# Altium footprint library Connector Header 254 Right Angel.PcbLib: 49 footprints (part 4 of 4)
Each footprint in its own frame and in the unit in brackets; x right, y up, seen from the top. Pads: shape width x height; smd on the part's side, far side on the other; paste and mask are expansions set on the pad; w line width, h text height; cw(c..) or ccw(c..) is an arc to the next point about the centre after c.
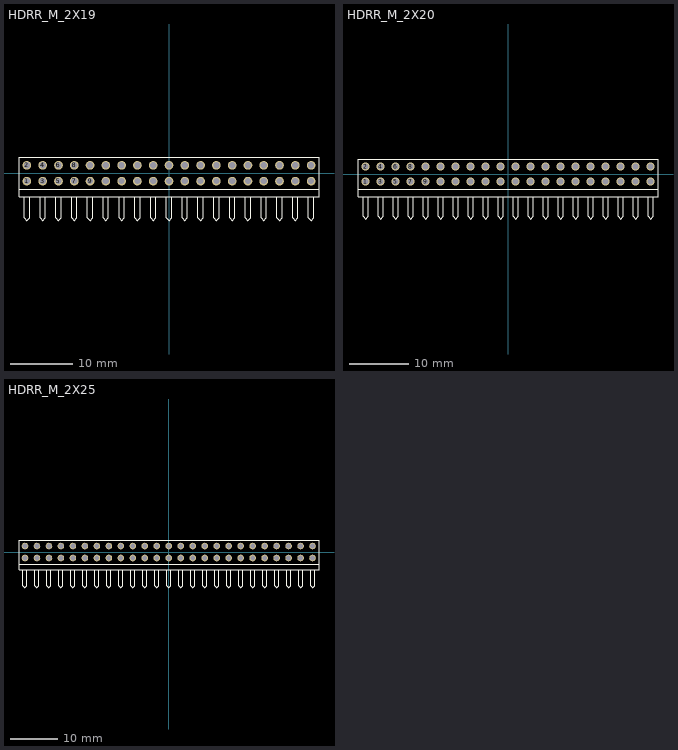
[diagram p3: the footprints below, top view; thin cyan lines are the x and y axes]

## HDRR_M_2X19 [mm] "Connector; Header; 19x2 Position"
height 7
pads (38):
  round 1.4 / inner round 1.4 / far side oval 1.4x2.2 hole 1: 1(-22.86,-1.27) 2(-22.86,1.27) 3(-20.32,-1.27) 4(-20.32,1.27) 5(-17.78,-1.27) 6(-17.78,1.27) 7(-15.24,-1.27) 8(-15.24,1.27) 9(-12.7,-1.27) 10(-12.7,1.27) 11(-10.16,-1.27) 12(-10.16,1.27) 13(-7.62,-1.27) 14(-7.62,1.27) 15(-5.08,-1.27) 16(-5.08,1.27) 17(-2.54,-1.27) 18(-2.54,1.27) 19(0,-1.27) 20(0,1.27) 21(2.54,-1.27) 22(2.54,1.27) 23(5.08,-1.27) 24(5.08,1.27) 25(7.62,-1.27) 26(7.62,1.27) 27(10.16,-1.27) 28(10.16,1.27) 29(12.7,-1.27) 30(12.7,1.27) 31(15.24,-1.27) 32(15.24,1.27) 33(17.78,-1.27) 34(17.78,1.27) 35(20.32,-1.27) 36(20.32,1.27) 37(22.86,-1.27) 38(22.86,1.27)
Top Overlay:
  lines w0.2: -23.283,-3.81 -23.283,-7.197 -22.86,-7.62 -22.437,-7.197 -22.437,-3.81 ; -20.743,-3.81 -20.743,-7.197 -20.32,-7.62 -19.897,-7.197 -19.897,-3.81 ; -18.203,-3.81 -18.203,-7.197 -17.78,-7.62 -17.357,-7.197 -17.357,-3.81 ; -15.663,-3.81 -15.663,-7.197 -15.24,-7.62 -14.817,-7.197 -14.817,-3.81 ; -13.123,-3.81 -13.123,-7.197 -12.7,-7.62 -12.277,-7.197 -12.277,-3.81 ; -10.583,-3.81 -10.583,-7.197 -10.16,-7.62 -9.737,-7.197 -9.737,-3.81 ; -8.043,-3.81 -8.043,-7.197 -7.62,-7.62 -7.197,-7.197 -7.197,-3.81 ; -5.503,-3.81 -5.503,-7.197 -5.08,-7.62 -4.657,-7.197 -4.657,-3.81 ; -2.963,-3.81 -2.963,-7.197 -2.54,-7.62 -2.117,-7.197 -2.117,-3.81 ; -0.423,-3.81 -0.423,-7.197 0,-7.62 0.423,-7.197 0.423,-3.81 ; 2.117,-3.81 2.117,-7.197 2.54,-7.62 2.963,-7.197 2.963,-3.81 ; 4.657,-3.81 4.657,-7.197 5.08,-7.62 5.503,-7.197 5.503,-3.81 ; 7.197,-3.81 7.197,-7.197 7.62,-7.62 8.043,-7.197 8.043,-3.81 ; 9.737,-3.81 9.737,-7.197 10.16,-7.62 10.583,-7.197 10.583,-3.81 ; 12.277,-3.81 12.277,-7.197 12.7,-7.62 13.123,-7.197 13.123,-3.81 ; 14.817,-3.81 14.817,-7.197 15.24,-7.62 15.663,-7.197 15.663,-3.81 ; 17.357,-3.81 17.357,-7.197 17.78,-7.62 18.203,-7.197 18.203,-3.81 ; 19.897,-3.81 19.897,-7.197 20.32,-7.62 20.743,-7.197 20.743,-3.81 ; 22.437,-3.81 22.437,-7.197 22.86,-7.62 23.283,-7.197 23.283,-3.81 ; -24.13,-2.54 -24.13,-3.81 24.13,-3.81 24.13,-2.54 ; -24.13,-2.54 -24.13,2.54 24.13,2.54 24.13,-2.54 ; -24.13,-2.54 24.13,-2.54
3D body "PLS-1R.step": height 5.45, standoff -3, extent 19.05,-8.62 21.59,0
3D body "PLS-1Rr.stp": height 7.99, standoff -3, extent 19.05,-8.62 21.59,2.54
3D body "PLS-1Rr.stp": height 7.99, standoff -3, extent 16.51,-8.62 19.05,2.54
3D body "PLS-1R.step": height 5.45, standoff -3, extent 16.51,-8.62 19.05,0
3D body "PLS-1R.step": height 5.45, standoff -3, extent 13.97,-8.62 16.51,0
3D body "PLS-1Rr.stp": height 7.99, standoff -3, extent 13.97,-8.62 16.51,2.54
3D body "PLS-1Rr.stp": height 7.99, standoff -3, extent 11.43,-8.62 13.97,2.54
3D body "PLS-1R.step": height 5.45, standoff -3, extent 11.43,-8.62 13.97,0
3D body "PLS-1R.step": height 5.45, standoff -3, extent 8.89,-8.62 11.43,0
3D body "PLS-1Rr.stp": height 7.99, standoff -3, extent 8.89,-8.62 11.43,2.54
3D body "PLS-1Rr.stp": height 7.99, standoff -3, extent 6.35,-8.62 8.89,2.54
3D body "PLS-1R.step": height 5.45, standoff -3, extent 6.35,-8.62 8.89,0
3D body "PLS-1R.step": height 5.45, standoff -3, extent 3.81,-8.62 6.35,0
3D body "PLS-1Rr.stp": height 7.99, standoff -3, extent 3.81,-8.62 6.35,2.54
3D body "PLS-1Rr.stp": height 7.99, standoff -3, extent 1.27,-8.62 3.81,2.54
3D body "PLS-1R.step": height 5.45, standoff -3, extent 1.27,-8.62 3.81,0
3D body "PLS-1R.step": height 5.45, standoff -3, extent -1.27,-8.62 1.27,0
3D body "PLS-1Rr.stp": height 7.99, standoff -3, extent -1.27,-8.62 1.27,2.54
3D body "PLS-1Rr.stp": height 7.99, standoff -3, extent -3.81,-8.62 -1.27,2.54
3D body "PLS-1R.step": height 5.45, standoff -3, extent -3.81,-8.62 -1.27,0
3D body "PLS-1R.step": height 5.45, standoff -3, extent -6.35,-8.62 -3.81,0
3D body "PLS-1Rr.stp": height 7.99, standoff -3, extent -6.35,-8.62 -3.81,2.54
3D body "PLS-1Rr.stp": height 7.99, standoff -3, extent -8.89,-8.62 -6.35,2.54
3D body "PLS-1R.step": height 5.45, standoff -3, extent -8.89,-8.62 -6.35,0
3D body "PLS-1R.step": height 5.45, standoff -3, extent -11.43,-8.62 -8.89,0
3D body "PLS-1Rr.stp": height 7.99, standoff -3, extent -11.43,-8.62 -8.89,2.54
3D body "PLS-1Rr.stp": height 7.99, standoff -3, extent -13.97,-8.62 -11.43,2.54
3D body "PLS-1R.step": height 5.45, standoff -3, extent -13.97,-8.62 -11.43,0
3D body "PLS-1R.step": height 5.45, standoff -3, extent -16.51,-8.62 -13.97,0
3D body "PLS-1Rr.stp": height 7.99, standoff -3, extent -16.51,-8.62 -13.97,2.54
3D body "PLS-1Rr.stp": height 7.99, standoff -3, extent -19.05,-8.62 -16.51,2.54
3D body "PLS-1R.step": height 5.45, standoff -3, extent -19.05,-8.62 -16.51,0
3D body "PLS-1R.step": height 5.45, standoff -3, extent -21.59,-8.62 -19.05,0
3D body "PLS-1Rr.stp": height 7.99, standoff -3, extent -21.59,-8.62 -19.05,2.54
3D body "PLS-1Rr.stp": height 7.99, standoff -3, extent -24.13,-8.62 -21.59,2.54
3D body "PLS-1R.step": height 5.45, standoff -3, extent -24.13,-8.62 -21.59,0
3D body "PLS-1R.step": height 5.45, standoff -3, extent 21.59,-8.62 24.13,0
3D body "PLS-1Rr.stp": height 7.99, standoff -3, extent 21.59,-8.62 24.13,2.54

## HDRR_M_2X20 [mm] "Connector; Header; 20x2 Position"
height 7
pads (40):
  round 1.4 / inner round 1.4 / far side oval 1.4x2.2 hole 1: 1(-24.13,-1.27) 2(-24.13,1.27) 3(-21.59,-1.27) 4(-21.59,1.27) 5(-19.05,-1.27) 6(-19.05,1.27) 7(-16.51,-1.27) 8(-16.51,1.27) 9(-13.97,-1.27) 10(-13.97,1.27) 11(-11.43,-1.27) 12(-11.43,1.27) 13(-8.89,-1.27) 14(-8.89,1.27) 15(-6.35,-1.27) 16(-6.35,1.27) 17(-3.81,-1.27) 18(-3.81,1.27) 19(-1.27,-1.27) 20(-1.27,1.27) 21(1.27,-1.27) 22(1.27,1.27) 23(3.81,-1.27) 24(3.81,1.27) 25(6.35,-1.27) 26(6.35,1.27) 27(8.89,-1.27) 28(8.89,1.27) 29(11.43,-1.27) 30(11.43,1.27) 31(13.97,-1.27) 32(13.97,1.27) 33(16.51,-1.27) 34(16.51,1.27) 35(19.05,-1.27) 36(19.05,1.27) 37(21.59,-1.27) 38(21.59,1.27) 39(24.13,-1.27) 40(24.13,1.27)
Top Overlay:
  lines w0.2: -24.553,-3.81 -24.553,-7.197 -24.13,-7.62 -23.707,-7.197 -23.707,-3.81 ; -22.013,-3.81 -22.013,-7.197 -21.59,-7.62 -21.167,-7.197 -21.167,-3.81 ; -19.473,-3.81 -19.473,-7.197 -19.05,-7.62 -18.627,-7.197 -18.627,-3.81 ; -16.933,-3.81 -16.933,-7.197 -16.51,-7.62 -16.087,-7.197 -16.087,-3.81 ; -14.393,-3.81 -14.393,-7.197 -13.97,-7.62 -13.547,-7.197 -13.547,-3.81 ; -11.853,-3.81 -11.853,-7.197 -11.43,-7.62 -11.007,-7.197 -11.007,-3.81 ; -9.313,-3.81 -9.313,-7.197 -8.89,-7.62 -8.467,-7.197 -8.467,-3.81 ; -6.773,-3.81 -6.773,-7.197 -6.35,-7.62 -5.927,-7.197 -5.927,-3.81 ; -4.233,-3.81 -4.233,-7.197 -3.81,-7.62 -3.387,-7.197 -3.387,-3.81 ; -1.693,-3.81 -1.693,-7.197 -1.27,-7.62 -0.847,-7.197 -0.847,-3.81 ; 0.847,-3.81 0.847,-7.197 1.27,-7.62 1.693,-7.197 1.693,-3.81 ; 3.387,-3.81 3.387,-7.197 3.81,-7.62 4.233,-7.197 4.233,-3.81 ; 5.927,-3.81 5.927,-7.197 6.35,-7.62 6.773,-7.197 6.773,-3.81 ; 8.467,-3.81 8.467,-7.197 8.89,-7.62 9.313,-7.197 9.313,-3.81 ; 11.007,-3.81 11.007,-7.197 11.43,-7.62 11.853,-7.197 11.853,-3.81 ; 13.547,-3.81 13.547,-7.197 13.97,-7.62 14.393,-7.197 14.393,-3.81 ; 16.087,-3.81 16.087,-7.197 16.51,-7.62 16.933,-7.197 16.933,-3.81 ; 18.627,-3.81 18.627,-7.197 19.05,-7.62 19.473,-7.197 19.473,-3.81 ; 21.167,-3.81 21.167,-7.197 21.59,-7.62 22.013,-7.197 22.013,-3.81 ; 23.707,-3.81 23.707,-7.197 24.13,-7.62 24.553,-7.197 24.553,-3.81 ; -25.4,-2.54 25.4,-2.54 ; -25.4,-2.54 -25.4,2.54 25.4,2.54 25.4,-2.54 ; -25.4,-2.54 -25.4,-3.81 25.4,-3.81 25.4,-2.54
3D body "PLS-1R.step": height 5.45, standoff -3, extent 22.86,-8.62 25.4,0
3D body "PLS-1Rr.stp": height 7.99, standoff -3, extent 22.86,-8.62 25.4,2.54
3D body "PLS-1Rr.stp": height 7.99, standoff -3, extent 20.32,-8.62 22.86,2.54
3D body "PLS-1R.step": height 5.45, standoff -3, extent 20.32,-8.62 22.86,0
3D body "PLS-1R.step": height 5.45, standoff -3, extent 17.78,-8.62 20.32,0
3D body "PLS-1Rr.stp": height 7.99, standoff -3, extent 17.78,-8.62 20.32,2.54
3D body "PLS-1Rr.stp": height 7.99, standoff -3, extent 15.24,-8.62 17.78,2.54
3D body "PLS-1R.step": height 5.45, standoff -3, extent 15.24,-8.62 17.78,0
3D body "PLS-1R.step": height 5.45, standoff -3, extent 12.7,-8.62 15.24,0
3D body "PLS-1Rr.stp": height 7.99, standoff -3, extent 12.7,-8.62 15.24,2.54
3D body "PLS-1Rr.stp": height 7.99, standoff -3, extent 10.16,-8.62 12.7,2.54
3D body "PLS-1R.step": height 5.45, standoff -3, extent 10.16,-8.62 12.7,0
3D body "PLS-1R.step": height 5.45, standoff -3, extent 7.62,-8.62 10.16,0
3D body "PLS-1Rr.stp": height 7.99, standoff -3, extent 7.62,-8.62 10.16,2.54
3D body "PLS-1Rr.stp": height 7.99, standoff -3, extent 5.08,-8.62 7.62,2.54
3D body "PLS-1R.step": height 5.45, standoff -3, extent 5.08,-8.62 7.62,0
3D body "PLS-1R.step": height 5.45, standoff -3, extent 2.54,-8.62 5.08,0
3D body "PLS-1Rr.stp": height 7.99, standoff -3, extent 2.54,-8.62 5.08,2.54
3D body "PLS-1Rr.stp": height 7.99, standoff -3, extent 0,-8.62 2.54,2.54
3D body "PLS-1R.step": height 5.45, standoff -3, extent 0,-8.62 2.54,0
3D body "PLS-1R.step": height 5.45, standoff -3, extent -2.54,-8.62 0,0
3D body "PLS-1Rr.stp": height 7.99, standoff -3, extent -2.54,-8.62 0,2.54
3D body "PLS-1Rr.stp": height 7.99, standoff -3, extent -5.08,-8.62 -2.54,2.54
3D body "PLS-1R.step": height 5.45, standoff -3, extent -5.08,-8.62 -2.54,0
3D body "PLS-1R.step": height 5.45, standoff -3, extent -7.62,-8.62 -5.08,0
3D body "PLS-1Rr.stp": height 7.99, standoff -3, extent -7.62,-8.62 -5.08,2.54
3D body "PLS-1Rr.stp": height 7.99, standoff -3, extent -10.16,-8.62 -7.62,2.54
3D body "PLS-1R.step": height 5.45, standoff -3, extent -10.16,-8.62 -7.62,0
3D body "PLS-1R.step": height 5.45, standoff -3, extent -12.7,-8.62 -10.16,0
3D body "PLS-1Rr.stp": height 7.99, standoff -3, extent -12.7,-8.62 -10.16,2.54
3D body "PLS-1Rr.stp": height 7.99, standoff -3, extent -15.24,-8.62 -12.7,2.54
3D body "PLS-1R.step": height 5.45, standoff -3, extent -15.24,-8.62 -12.7,0
3D body "PLS-1R.step": height 5.45, standoff -3, extent -17.78,-8.62 -15.24,0
3D body "PLS-1Rr.stp": height 7.99, standoff -3, extent -17.78,-8.62 -15.24,2.54
3D body "PLS-1Rr.stp": height 7.99, standoff -3, extent -20.32,-8.62 -17.78,2.54
3D body "PLS-1R.step": height 5.45, standoff -3, extent -20.32,-8.62 -17.78,0
3D body "PLS-1R.step": height 5.45, standoff -3, extent -22.86,-8.62 -20.32,0
3D body "PLS-1Rr.stp": height 7.99, standoff -3, extent -22.86,-8.62 -20.32,2.54
3D body "PLS-1Rr.stp": height 7.99, standoff -3, extent -25.4,-8.62 -22.86,2.54
3D body "PLS-1R.step": height 5.45, standoff -3, extent -25.4,-8.62 -22.86,0

## HDRR_M_2X25 [mm] "Connector; Header; 25x2 Position"
height 7
pads (50):
  round 1.4 / inner round 1.4 / far side oval 1.4x2.2 hole 1: 1(-30.48,-1.27) 2(-30.48,1.27) 3(-27.94,-1.27) 4(-27.94,1.27) 5(-25.4,-1.27) 6(-25.4,1.27) 7(-22.86,-1.27) 8(-22.86,1.27) 9(-20.32,-1.27) 10(-20.32,1.27) 11(-17.78,-1.27) 12(-17.78,1.27) 13(-15.24,-1.27) 14(-15.24,1.27) 15(-12.7,-1.27) 16(-12.7,1.27) 17(-10.16,-1.27) 18(-10.16,1.27) 19(-7.62,-1.27) 20(-7.62,1.27) 21(-5.08,-1.27) 22(-5.08,1.27) 23(-2.54,-1.27) 24(-2.54,1.27) 25(0,-1.27) 26(0,1.27) 27(2.54,-1.27) 28(2.54,1.27) 29(5.08,-1.27) 30(5.08,1.27) 31(7.62,-1.27) 32(7.62,1.27) 33(10.16,-1.27) 34(10.16,1.27) 35(12.7,-1.27) 36(12.7,1.27) 37(15.24,-1.27) 38(15.24,1.27) 39(17.78,-1.27) 40(17.78,1.27) 41(20.32,-1.27) 42(20.32,1.27) 43(22.86,-1.27) 44(22.86,1.27) 45(25.4,-1.27) 46(25.4,1.27) 47(27.94,-1.27) 48(27.94,1.27) 49(30.48,-1.27) 50(30.48,1.27)
Top Overlay:
  lines w0.2: -30.903,-3.81 -30.903,-7.197 -30.48,-7.62 -30.057,-7.197 -30.057,-3.81 ; -28.363,-3.81 -28.363,-7.197 -27.94,-7.62 -27.517,-7.197 -27.517,-3.81 ; -25.823,-3.81 -25.823,-7.197 -25.4,-7.62 -24.977,-7.197 -24.977,-3.81 ; -23.283,-3.81 -23.283,-7.197 -22.86,-7.62 -22.437,-7.197 -22.437,-3.81 ; -20.743,-3.81 -20.743,-7.197 -20.32,-7.62 -19.897,-7.197 -19.897,-3.81 ; -18.203,-3.81 -18.203,-7.197 -17.78,-7.62 -17.357,-7.197 -17.357,-3.81 ; -15.663,-3.81 -15.663,-7.197 -15.24,-7.62 -14.817,-7.197 -14.817,-3.81 ; -13.123,-3.81 -13.123,-7.197 -12.7,-7.62 -12.277,-7.197 -12.277,-3.81 ; -10.583,-3.81 -10.583,-7.197 -10.16,-7.62 -9.737,-7.197 -9.737,-3.81 ; -8.043,-3.81 -8.043,-7.197 -7.62,-7.62 -7.197,-7.197 -7.197,-3.81 ; -5.503,-3.81 -5.503,-7.197 -5.08,-7.62 -4.657,-7.197 -4.657,-3.81 ; -2.963,-3.81 -2.963,-7.197 -2.54,-7.62 -2.117,-7.197 -2.117,-3.81 ; -0.423,-3.81 -0.423,-7.197 0,-7.62 0.423,-7.197 0.423,-3.81 ; 2.117,-3.81 2.117,-7.197 2.54,-7.62 2.963,-7.197 2.963,-3.81 ; 4.657,-3.81 4.657,-7.197 5.08,-7.62 5.503,-7.197 5.503,-3.81 ; 7.197,-3.81 7.197,-7.197 7.62,-7.62 8.043,-7.197 8.043,-3.81 ; 9.737,-3.81 9.737,-7.197 10.16,-7.62 10.583,-7.197 10.583,-3.81 ; 12.277,-3.81 12.277,-7.197 12.7,-7.62 13.123,-7.197 13.123,-3.81 ; 14.817,-3.81 14.817,-7.197 15.24,-7.62 15.663,-7.197 15.663,-3.81 ; 17.357,-3.81 17.357,-7.197 17.78,-7.62 18.203,-7.197 18.203,-3.81 ; 19.897,-3.81 19.897,-7.197 20.32,-7.62 20.743,-7.197 20.743,-3.81 ; 22.437,-3.81 22.437,-7.197 22.86,-7.62 23.283,-7.197 23.283,-3.81 ; 24.977,-3.81 24.977,-7.197 25.4,-7.62 25.823,-7.197 25.823,-3.81 ; 27.517,-3.81 27.517,-7.197 27.94,-7.62 28.363,-7.197 28.363,-3.81 ; 30.057,-3.81 30.057,-7.197 30.48,-7.62 30.903,-7.197 30.903,-3.81 ; -31.75,-2.54 31.85,-2.54 ; -31.75,-2.54 -31.75,-3.81 31.85,-3.81 31.85,-2.54 ; -31.75,-2.54 -31.75,2.54 31.85,2.54 31.85,-2.54
3D body "PLS-1R.step": height 5.45, standoff -3, extent 29.21,-8.62 31.75,0
3D body "PLS-1Rr.stp": height 7.99, standoff -3, extent 29.21,-8.62 31.75,2.54
3D body "PLS-1R.step": height 5.45, standoff -3, extent 26.67,-8.62 29.21,0
3D body "PLS-1Rr.stp": height 7.99, standoff -3, extent 26.67,-8.62 29.21,2.54
3D body "PLS-1R.step": height 5.45, standoff -3, extent 24.13,-8.62 26.67,0
3D body "PLS-1Rr.stp": height 7.99, standoff -3, extent 24.13,-8.62 26.67,2.54
3D body "PLS-1R.step": height 5.45, standoff -3, extent 21.59,-8.62 24.13,0
3D body "PLS-1Rr.stp": height 7.99, standoff -3, extent 21.59,-8.62 24.13,2.54
3D body "PLS-1R.step": height 5.45, standoff -3, extent 19.05,-8.62 21.59,0
3D body "PLS-1Rr.stp": height 7.99, standoff -3, extent 19.05,-8.62 21.59,2.54
3D body "PLS-1R.step": height 5.45, standoff -3, extent -31.75,-8.62 -29.21,0
3D body "PLS-1Rr.stp": height 7.99, standoff -3, extent -31.75,-8.62 -29.21,2.54
3D body "PLS-1Rr.stp": height 7.99, standoff -3, extent -29.21,-8.62 -26.67,2.54
3D body "PLS-1R.step": height 5.45, standoff -3, extent -29.21,-8.62 -26.67,0
3D body "PLS-1R.step": height 5.45, standoff -3, extent -26.67,-8.62 -24.13,0
3D body "PLS-1Rr.stp": height 7.99, standoff -3, extent -26.67,-8.62 -24.13,2.54
3D body "PLS-1Rr.stp": height 7.99, standoff -3, extent -24.13,-8.62 -21.59,2.54
3D body "PLS-1R.step": height 5.45, standoff -3, extent -24.13,-8.62 -21.59,0
3D body "PLS-1R.step": height 5.45, standoff -3, extent -21.59,-8.62 -19.05,0
3D body "PLS-1Rr.stp": height 7.99, standoff -3, extent -21.59,-8.62 -19.05,2.54
3D body "PLS-1Rr.stp": height 7.99, standoff -3, extent -19.05,-8.62 -16.51,2.54
3D body "PLS-1R.step": height 5.45, standoff -3, extent -19.05,-8.62 -16.51,0
3D body "PLS-1R.step": height 5.45, standoff -3, extent -16.51,-8.62 -13.97,0
3D body "PLS-1Rr.stp": height 7.99, standoff -3, extent -16.51,-8.62 -13.97,2.54
3D body "PLS-1Rr.stp": height 7.99, standoff -3, extent -13.97,-8.62 -11.43,2.54
3D body "PLS-1R.step": height 5.45, standoff -3, extent -13.97,-8.62 -11.43,0
3D body "PLS-1R.step": height 5.45, standoff -3, extent -11.43,-8.62 -8.89,0
3D body "PLS-1Rr.stp": height 7.99, standoff -3, extent -11.43,-8.62 -8.89,2.54
3D body "PLS-1Rr.stp": height 7.99, standoff -3, extent -8.89,-8.62 -6.35,2.54
3D body "PLS-1R.step": height 5.45, standoff -3, extent -8.89,-8.62 -6.35,0
3D body "PLS-1R.step": height 5.45, standoff -3, extent -6.35,-8.62 -3.81,0
3D body "PLS-1Rr.stp": height 7.99, standoff -3, extent -6.35,-8.62 -3.81,2.54
3D body "PLS-1Rr.stp": height 7.99, standoff -3, extent -3.81,-8.62 -1.27,2.54
3D body "PLS-1R.step": height 5.45, standoff -3, extent -3.81,-8.62 -1.27,0
3D body "PLS-1R.step": height 5.45, standoff -3, extent -1.27,-8.62 1.27,0
3D body "PLS-1Rr.stp": height 7.99, standoff -3, extent -1.27,-8.62 1.27,2.54
3D body "PLS-1Rr.stp": height 7.99, standoff -3, extent 1.27,-8.62 3.81,2.54
3D body "PLS-1R.step": height 5.45, standoff -3, extent 1.27,-8.62 3.81,0
3D body "PLS-1R.step": height 5.45, standoff -3, extent 3.81,-8.62 6.35,0
3D body "PLS-1Rr.stp": height 7.99, standoff -3, extent 3.81,-8.62 6.35,2.54
3D body "PLS-1Rr.stp": height 7.99, standoff -3, extent 6.35,-8.62 8.89,2.54
3D body "PLS-1R.step": height 5.45, standoff -3, extent 6.35,-8.62 8.89,0
3D body "PLS-1R.step": height 5.45, standoff -3, extent 8.89,-8.62 11.43,0
3D body "PLS-1Rr.stp": height 7.99, standoff -3, extent 8.89,-8.62 11.43,2.54
3D body "PLS-1Rr.stp": height 7.99, standoff -3, extent 11.43,-8.62 13.97,2.54
3D body "PLS-1R.step": height 5.45, standoff -3, extent 11.43,-8.62 13.97,0
3D body "PLS-1R.step": height 5.45, standoff -3, extent 13.97,-8.62 16.51,0
3D body "PLS-1Rr.stp": height 7.99, standoff -3, extent 13.97,-8.62 16.51,2.54
3D body "PLS-1Rr.stp": height 7.99, standoff -3, extent 16.51,-8.62 19.05,2.54
3D body "PLS-1R.step": height 5.45, standoff -3, extent 16.51,-8.62 19.05,0